# Altium integrated library SCD40-D-R2.IntLib: 1 symbol
Pins are listed as number, name and electrical type; pins without a type are passive.

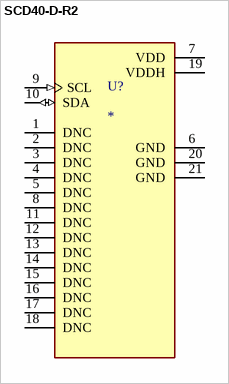
[diagram p0: symbol SCD40-D-R2]

## SCD40-D-R2
designator U?
Air Quality Sensor CO2 Sensor 2.5V/3.3V/5V 20-Pin SMD EP; MF: Sensirion AG; MP: SCD40-D-R2; SnapEDA_Link: https://www.snapeda.com/parts/SCD40-D-R2/Sensirion+AG/view-part/?ref=snap; Package: None; Value: *; Check_prices: https://www.snapeda.com/parts/SCD40-D-R2/Sensirion+AG/view-part/?ref=eda
footprint XDCR_SCD40-D-R2
pins: 1 DNC, 2 DNC, 3 DNC, 4 DNC, 5 DNC, 6 GND (power), 7 VDD (power), 8 DNC, 9 SCL (in), 10 SDA (io), 11 DNC, 12 DNC, 13 DNC, 14 DNC, 15 DNC, 16 DNC, 17 DNC, 18 DNC, 19 VDDH (power), 20 GND (power), 21 GND (power)